# Altium schematic symbol library LQH44NN471K03L.SchLib: 1 symbol
Pins are listed as number, name and electrical type; pins without a type are passive.

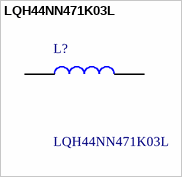
[diagram p0: symbol LQH44NN471K03L]

## LQH44NN471K03L
designator L?
LQH44NN_03 Series Inductor 470uH +/-10% 1515 (4040); Manufacturer_Name: Murata Electronics; Geometry.Height: 4.5mm; Mouser Part Number: 81-LQH44NN471K03L; Mouser Price/Stock: https://www.mouser.co.uk/ProductDetail/Murata-Electronics/LQH44NN471K03L?qs=p1l%252BOuySasK24fzs1UZzCQ%3D%3D; Manufacturer_Part_Number: LQH44NN471K03L; Datasheet Link: https://search.murata.co.jp/Ceramy/image/img/P02/JELF243A-0097.pdf
footprint LQH44NN100K03L
pins: 1, 2